# Altium footprint library Trimmer.PcbLib: 11 footprints
Each footprint in its own frame and in the unit in brackets; x right, y up, seen from the top. Pads: shape width x height; smd on the part's side, far side on the other; paste and mask are expansions set on the pad; w line width, h text height; cw(c..) or ccw(c..) is an arc to the next point about the centre after c.
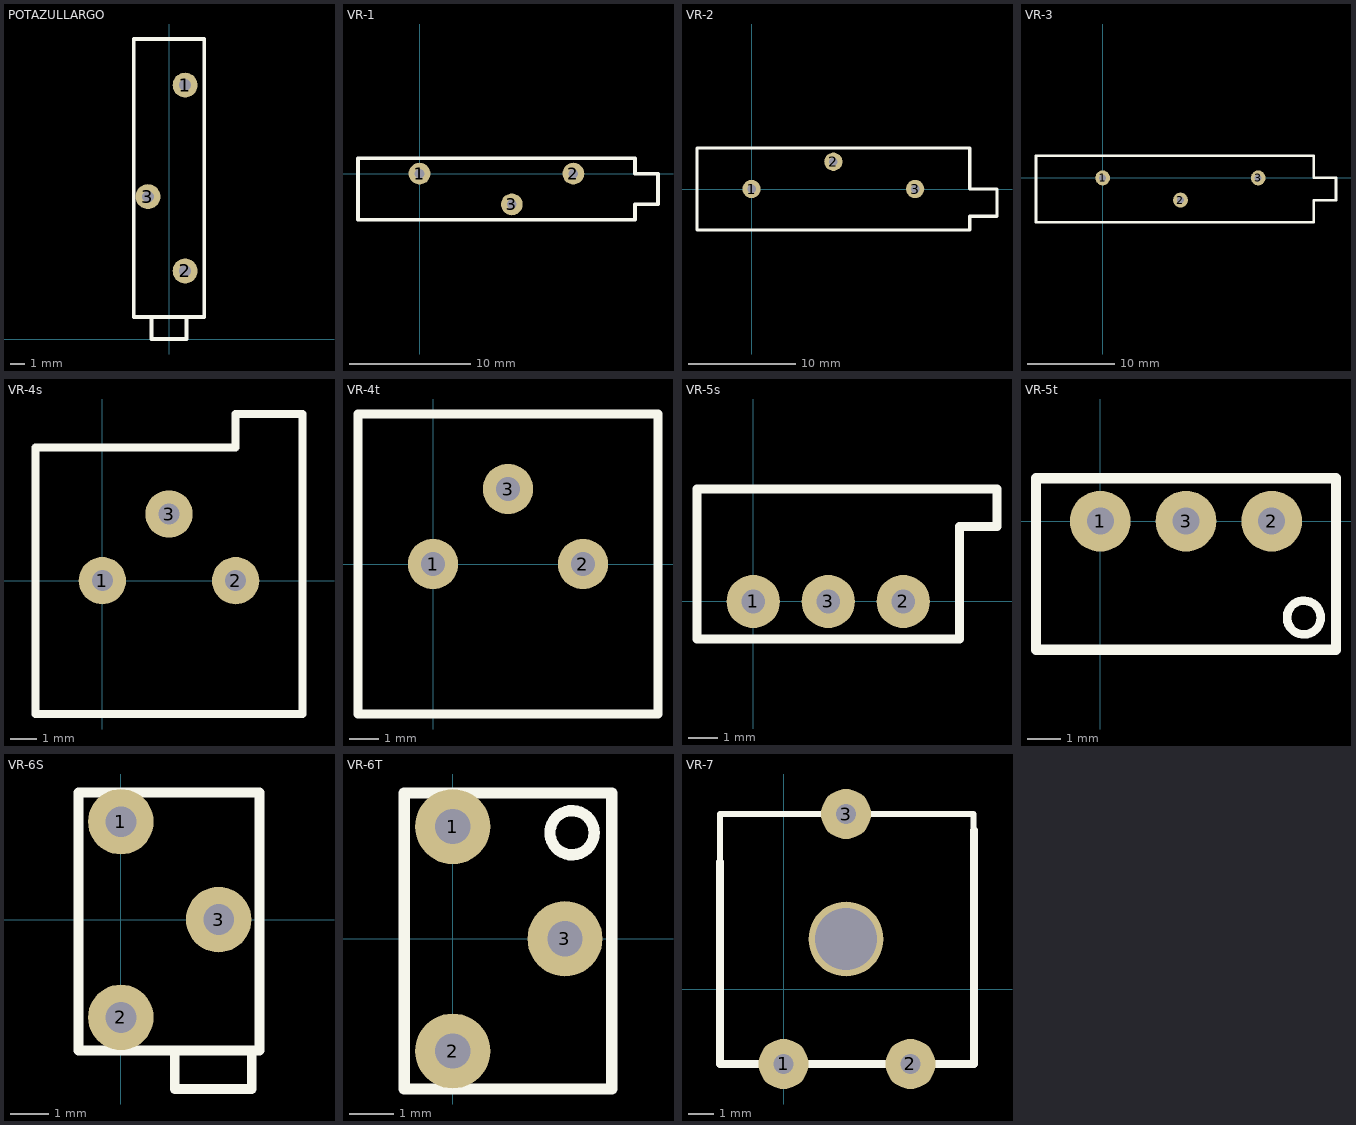
[diagram p0: the footprints below, top view; thin cyan lines are the x and y axes]

## POTAZULLARGO [mm]
pads (3):
  round 1.7 hole 0.8: 1(1.1,17.35) 2(1.1,4.65) 3(-1.44,9.73)
Top Overlay:
  lines w0.254: -1.2,1.5 -1.2,0 1.2,0 ; 1.2,0 1.2,0 ; 1.2,0 1.2,1.5 2.4,1.5 ; 2.4,1.5 2.4,20.5 -2.4,20.5 -2.4,1.5 2.4,1.5

## VR-1 [mm]
pads (3):
  round 1.8 hole 0.8: 1(0,0) 2(12.7,0) 3(7.62,-2.54)
Top Overlay:
  lines w0.305: -5.08,-3.81 -5.08,1.27 17.78,1.27 17.78,0 19.685,0 19.685,-2.54 17.78,-2.54 17.78,-3.81 -5.08,-3.81
3D body "pot4s.step": height 8.05, standoff -3, extent -5.08,-3.81 19.65,1.27

## VR-2 [mm]
pads (3):
  round 1.7 hole 0.8: 1(0,0) 2(7.62,2.54) 3(15.24,0)
Top Overlay:
  lines w0.305: -5.08,-3.81 -5.08,3.81 20.32,3.81 20.32,0 22.86,0 22.86,-2.54 20.32,-2.54 20.32,-3.81 -5.08,-3.81

## VR-3 [mm]
pads (3):
  round 1.7 hole 0.8: 1(0,0) 2(8.89,-2.54) 3(17.78,0)
Top Overlay:
  lines w0.305: -7.62,-5.08 24.13,-5.08 24.13,-2.54 26.67,-2.54 26.67,0 24.13,0 24.13,2.54 -7.62,2.54 -7.62,-5.08

## VR-4s [mm]
pads (3):
  round 1.8 hole 0.8: 1(0,0) 2(5.08,0) 3(2.54,2.54)
Top Overlay:
  lines w0.305: -2.54,-5.08 7.62,-5.08 7.62,6.35 5.08,6.35 5.08,5.08 -2.54,5.08 -2.54,-5.08
3D body "pot2s.step": height 5.1, standoff -3, extent -2.54,-5.11 7.62,6.32

## VR-4t [mm]
pads (3):
  round 1.7 hole 0.8: 1(0,0) 2(5.08,0) 3(2.54,2.54)
Top Overlay:
  lines w0.305: -2.54,-5.08 -2.54,5.08 7.62,5.08 7.62,-5.08 -2.54,-5.08
3D body "pot2t.step": height 5.8, standoff -3, extent -2.54,-5.11 7.62,5.05

## VR-5s [mm]
pads (3):
  round 1.8 hole 0.8: 1(0,0) 2(5.08,0) 3(2.54,0)
Top Overlay:
  lines w0.305: -1.905,-1.27 -1.905,3.81 8.255,3.81 8.255,2.54 6.985,2.54 6.985,-1.27 -1.905,-1.27
3D body "pot3s.step": height 8.9, standoff -3, extent -1.905,-1.27 8.26,3.81

## VR-5t [mm]
pads (3):
  round 1.8 hole 0.8: 1(0,0) 2(5.08,0) 3(2.54,0)
Top Overlay:
  circle w0.254: c6.032,-2.857 r0.5
  lines w0.305: -1.905,-3.81 6.985,-3.81 6.985,1.27 -1.905,1.27 -1.905,-3.81
3D body "pot3t.step": height 9.7, standoff -3, extent -1.905,-3.81 6.985,1.27

## VR-6S [mm]
pads (3):
  round 1.7 hole 0.8: 1(0,2.54) 2(0,-2.54) 3(2.54,0)
Top Overlay:
  lines w0.254: 1,-3.4 3,-3.4 ; -1.1,-3.4 -1.1,3.3 3.6,3.3 3.6,-3.4 -1.1,-3.4 ; 1.4,-4.4 1.4,-3.4 3.4,-3.4 3.4,-4.4 1.4,-4.4

## VR-6T [mm]
pads (3):
  round 1.7 hole 0.8: 1(0,2.54) 2(0,-2.54) 3(2.54,0)
Top Overlay:
  circle w0.254: c2.7,2.4 r0.5
  lines w0.254: 1,-3.4 3,-3.4 ; 1.4,-3.4 3.4,-3.4 ; -1.1,-3.4 -1.1,3.3 3.6,3.3 3.6,-3.4 -1.1,-3.4

## VR-7 [mm]
pads (4):
  round 2 hole 0.8: 1(0,-3) 2(5.08,-3) 3(2.5,7)
  round 3 hole 2.5: ""(2.5,2)
Top Overlay:
  lines w0.254: -2.54,5.08 -2.54,7 7.6,7 7.6,6.33 7.61,6.32
  lines w0.305: -2.54,5.08 -2.54,-3 7.62,-3 7.62,6.35